# Altium footprint library Sensor$.PcbLib: 43 footprints (part 3 of 3)
Each footprint in its own frame and in the unit in brackets; x right, y up, seen from the top. Pads: shape width x height; smd on the part's side, far side on the other; paste and mask are expansions set on the pad; w line width, h text height; cw(c..) or ccw(c..) is an arc to the next point about the centre after c.
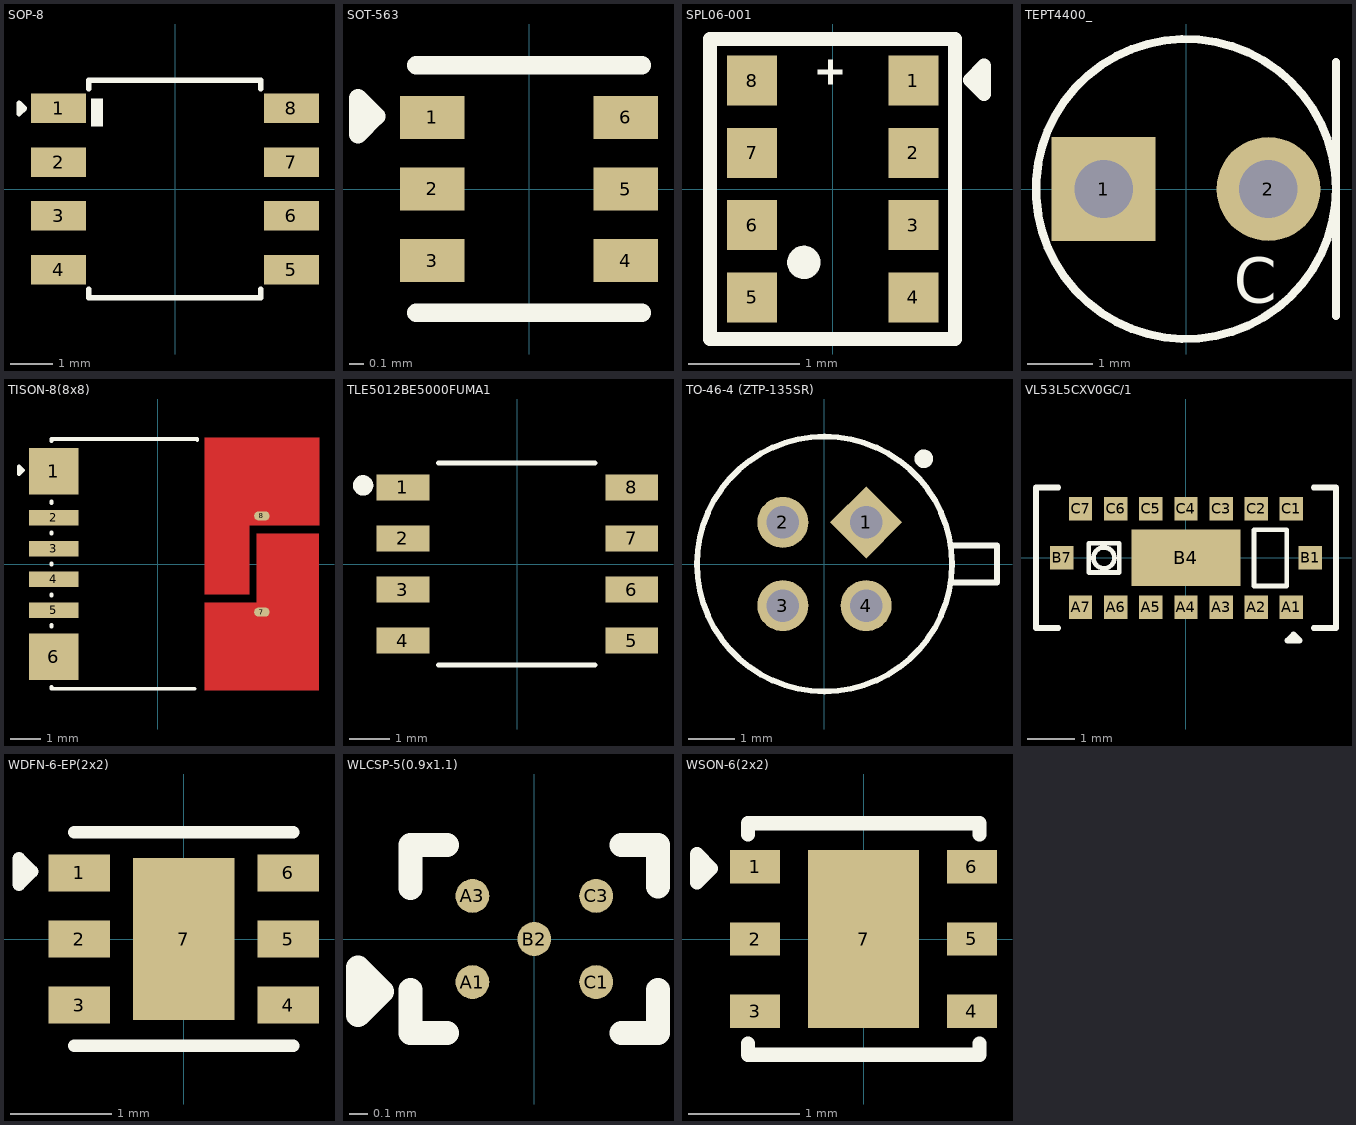
[diagram p2: the footprints below, top view; thin cyan lines are the x and y axes]

## SOP-8 [mm]
pads (8):
  rect 1.3x0.7 smd: 1(-2.75,1.905) 2(-2.75,0.635) 3(-2.75,-0.635) 4(-2.75,-1.905) 5(2.75,-1.905) 6(2.75,-0.635) 7(2.75,0.635) 8(2.75,1.905)
Top Overlay:
  rectangle: -1.981,1.473 -1.702,2.134
  lines w0.127: -2.036,-2.362 -2.036,-2.565 2.028,-2.565 2.028,-2.362 ; -2.036,2.362 -2.036,2.565 2.028,2.565 2.028,2.362 ; -3.687,1.778 -3.687,2.032 -3.56,1.905 -3.687,1.778
3D body "TRANS_IRF7103TRPBF_INF.step": height 1.76, standoff 0, extent -3.099,-2.502 3.099,2.502

## SOT-563 [mm]
pads (6):
  rect 0.45x0.3 smd: 1(-0.675,0.5) 2(-0.675,0) 3(-0.675,-0.5) 4(0.675,-0.5) 5(0.675,0) 6(0.675,0.5)
Top Overlay:
  lines w0.127: -0.787,-0.864 0.787,-0.864 ; -0.787,0.864 0.787,0.864 ; -1.194,0.381 -1.194,0.635 -1.067,0.508 -1.194,0.381
3D body "TMP112AIDRLR--3DModel-STEP-56544.STEP": height 0.6, standoff 0, extent -0.8,-0.8 0.8,0.8

## SPL06-001 [mm]
pads (8):
  rect 0.45x0.45 smd: 1(0.725,0.975) 2(0.725,0.325) 3(0.725,-0.325) 4(0.725,-0.975) 5(-0.725,-0.975) 6(-0.725,-0.325) 7(-0.725,0.325) 8(-0.725,0.975)
Top Overlay:
  circle w0.15: c-0.26,-0.66 r0.075
  region: 0.084,1.032 -0.136,1.032 -0.136,1.072 0.084,1.072
  region: -0.04,0.94 -0.04,1.16 0,1.16 0,0.94
  lines w0.127: -1.104,-1.349 1.1,-1.349 1.1,1.349 -1.104,1.349 -1.104,-1.349 ; 1.233,0.981 1.36,1.108 1.36,0.854 1.233,0.981
3D body "C2684428.step": height 0.96, standoff 0, extent -1,-1.25 1,1.25

## TEPT4400_ [mm]
pads (2):
  rect 1.6x1.6 hole 0.9: 1(-1.27,0)
  round 1.6 hole 0.9: 2(1.27,0)
Top Overlay:
  circle w0.127: c0,0 r2.311
  lines w0.127: 2.311,-1.956 2.311,0 2.311,1.956
  text "C" at 0.737,-1.753 h0.7
3D body "LED 3mm White.step": height 6.6, standoff -6, extent -1.925,-1.924 1.65,1.924

## TISON-8(8x8) [mm]
pads (8):
  rect 1.6x1.5 smd: 1(-3.364,3) 6(-3.364,-3)
  rect 1.6x0.5 smd: 2(-3.364,1.5) 3(-3.364,0.5) 4(-3.364,-0.5) 5(-3.364,-1.5)
  oval 0.5x0.3 smd: 7(3.364,-1.556) 8(3.364,1.556)
Top Layer:
  region: 1.514,-4.092 1.514,-1.257 3.203,-1.257 3.203,0.98 5.214,0.98 5.214,-4.092
  region: 5.214,4.092 5.214,1.257 2.964,1.257 2.964,-0.98 1.514,-0.98 1.514,4.092
Top Overlay:
  lines w0.127: -3.437,-3.981 -3.437,-4.038 1.185,-4.038 ; -3.437,-2.019 -3.437,-1.981 ; -3.437,-1.019 -3.437,-0.981 ; -3.437,-0.019 -3.437,0.019 ; -3.437,0.981 -3.437,1.019 ; -3.437,1.981 -3.437,2.019 ; -3.437,3.981 -3.437,4.052 1.274,4.052 1.274,4.014 ; -4.496,2.908 -4.369,3.035 -4.496,3.162 -4.496,2.908
3D body "C540236.step": height 1.07, standoff 0, extent -3.405,-4 4.595,4

## TLE5012BE5000FUMA1 [mm] "SENSOR ANGLE 360DEG SMD"
pads (8):
  rect 1.31x0.65 smd: 1(-2.845,1.905) 2(-2.845,0.635) 3(-2.845,-0.635) 4(-2.845,-1.905) 5(2.845,-1.905) 6(2.845,-0.635) 7(2.845,0.635) 8(2.845,1.905)
Top Overlay:
  circle w0.254: c-3.835,1.956 r0.127
  lines w0.127: -1.956,-2.515 1.93,-2.515 ; -1.956,2.515 1.93,2.515
3D body "User Library-SOIC-8-1.step": height 1.75, standoff 0, extent -3,-2.45 3,2.45

## TO-46-4 (ZTP-135SR) [mm]
pads (4):
  rect 1.1x1.1 hole 0.7 rot 45: 1(0.898,0.898)
  round 1.1 hole 0.7: 2(-0.898,0.898) 3(-0.898,-0.898) 4(0.898,-0.898)
Top Overlay:
  circle w0.2: c2.143,2.27 r0.1
  circle w0.127: c0,0 r2.75
  lines w0.127: 2.721,-0.4 3.721,-0.4 3.721,0.4 2.721,0.4
3D body "ZTP-135SR--3DModel-STEP-56544.STEP": height 3.05, standoff -14.48, extent -2.656,-2.667 3.683,2.667

## VL53L5CXV0GC/1 [mm]
pads (17):
  rect 0.5x0.5 smd paste+0 mask+0.05: A1(2.25,-1.05) A2(1.5,-1.05) A3(0.75,-1.05) A4(0,-1.05) A5(-0.75,-1.05) A6(-1.5,-1.05) A7(-2.25,-1.05) B1(2.65,0) B7(-2.65,0) C1(2.25,1.05) C2(1.5,1.05) C3(0.75,1.05) C4(0,1.05) C5(-0.75,1.05) C6(-1.5,1.05) C7(-2.25,1.05)
  rect 2.316x1.2 smd paste+0 mask+0.05: B4(0,0)
Top Overlay:
  circle w0.1: c-1.75,0 r0.224
  lines w0.1: -2.077,-0.313 -1.422,-0.313 -1.422,0.313 -2.077,0.313 -2.077,-0.313 ; 1.45,-0.6 2.15,-0.6 2.15,0.6 1.45,0.6 1.45,-0.6
  lines w0.127: -2.725,-1.5 -3.2,-1.5 -3.2,1.5 -2.725,1.5 ; 2.725,-1.5 3.2,-1.5 3.2,1.5 2.725,1.5 ; 2.17,-1.761 2.297,-1.634 2.424,-1.761 2.17,-1.761
3D body "VL53L5CXV0GC_1.STEP": height 1.5, standoff 0, extent -3.2,-1.515 3.2,1.515

## WDFN-6-EP(2x2) [mm]
pads (7):
  rect 0.607x0.364 smd: 1(-1.028,0.65) 2(-1.028,0) 3(-1.028,-0.65) 4(1.028,-0.65) 5(1.028,0) 6(1.028,0.65)
  rect 1x1.6 smd: 7(0,0)
Top Overlay:
  lines w0.127: -1.076,-1.051 1.076,-1.051 ; -1.076,1.051 1.076,1.051 ; -1.622,0.537 -1.622,0.791 -1.495,0.664 -1.622,0.537
3D body "C699536.step": height 0.81, standoff 0, extent -1.01,-1 1.01,1

## WLCSP-5(0.9x1.1) [mm]
pads (5):
  round 0.18 smd paste-100 mask+0.05: A1(-0.329,-0.229) A3(-0.329,0.229) B2(0,0) C1(0.329,-0.229) C3(0.329,0.229)
Top Overlay:
  lines w0.127: -0.658,-0.27 -0.658,-0.5 -0.464,-0.5 ; -0.658,0.27 -0.658,0.5 -0.464,0.5 ; 0.464,-0.5 0.658,-0.5 0.658,-0.27 ; 0.464,0.5 0.658,0.5 0.658,0.28 ; -0.938,-0.406 -0.811,-0.279 -0.938,-0.152 -0.938,-0.406
Top Paste:
  region: -0.399,0.319 -0.259,0.319 -0.239,0.299 -0.239,0.159 -0.259,0.139 -0.399,0.139 -0.419,0.159 -0.419,0.299
  region: -0.399,-0.139 -0.259,-0.139 -0.239,-0.159 -0.239,-0.299 -0.259,-0.319 -0.399,-0.319 -0.419,-0.299 -0.419,-0.159
  region: 0.259,-0.139 0.399,-0.139 0.419,-0.159 0.419,-0.299 0.399,-0.319 0.259,-0.319 0.239,-0.299 0.239,-0.159
  region: -0.07,0.09 0.07,0.09 0.09,0.07 0.09,-0.07 0.07,-0.09 -0.07,-0.09 -0.09,-0.07 -0.09,0.07
  region: 0.259,0.319 0.399,0.319 0.419,0.299 0.419,0.159 0.399,0.139 0.259,0.139 0.239,0.159 0.239,0.299
3D body "C3715865.step": height 0.59, standoff 0, extent -0.57,-0.465 0.57,0.465

## WSON-6(2x2) [mm]
pads (7):
  rect 0.45x0.3 smd: 1(-0.975,0.65) 2(-0.975,0) 3(-0.975,-0.65) 4(0.975,-0.65) 5(0.975,0) 6(0.975,0.65)
  rect 1x1.6 smd: 7(0,0)
Top Overlay:
  lines w0.127: -1.041,-0.941 -1.041,-1.041 1.041,-1.041 1.041,-0.941 ; -1.041,0.941 -1.041,1.041 1.041,1.041 1.041,0.941 ; -1.499,0.508 -1.372,0.635 -1.499,0.762 -1.499,0.508
3D body "TPS7A2633DRVR.STEP": height 0.69, standoff -0.06, extent -1,-1 1,1